# Altium footprint library LimeMicroAltiumLib.PcbLib: 876 footprints (part 32 of 57)
Each footprint in its own frame and in the unit in brackets; x right, y up, seen from the top. Pads: shape width x height; smd on the part's side, far side on the other; paste and mask are expansions set on the pad; w line width, h text height; cw(c..) or ccw(c..) is an arc to the next point about the centre after c.
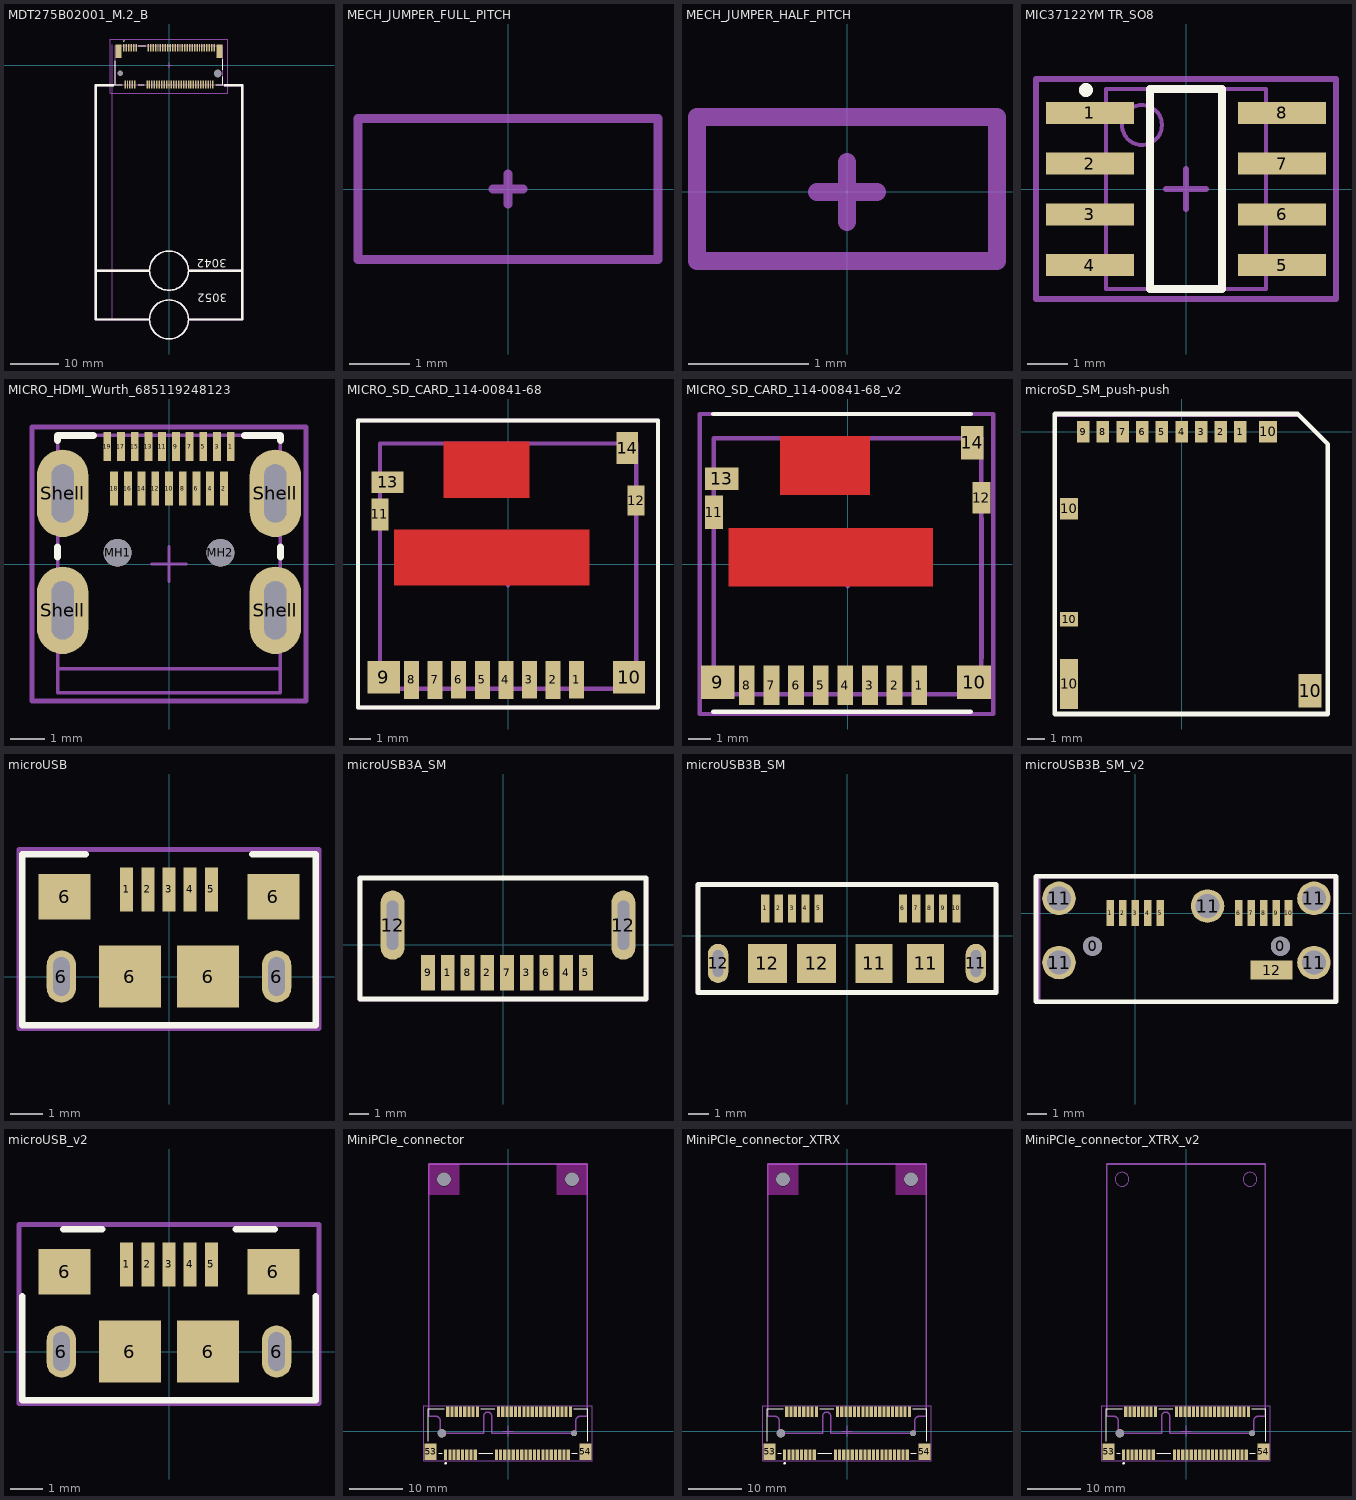
[diagram p31: the footprints below, top view; thin cyan lines are the x and y axes]

## MDT275B02001_M.2_B [mm]
pads (71):
  rect 0.3x1.55 smd mask+0.03: 1(-9.25,3.6) 2(-9,-3.95) 3(-8.75,3.6) 4(-8.5,-3.95) 5(-8.25,3.6) 6(-8,-3.95) 7(-7.75,3.6) 8(-7.5,-3.95) 9(-7.25,3.6) 10(-7,-3.95) 11(-6.75,3.6) 20(-4.5,-3.95) 21(-4.25,3.6) 22(-4,-3.95) 23(-3.75,3.6) 24(-3.5,-3.95) 25(-3.25,3.6) 26(-3,-3.95) 27(-2.75,3.6) 28(-2.5,-3.95) 29(-2.25,3.6) 30(-2,-3.95) 31(-1.75,3.6) 32(-1.5,-3.95) 33(-1.25,3.6) 34(-1,-3.95) 35(-0.75,3.6) 36(-0.5,-3.95) 37(-0.25,3.6) 38(0,-3.95) 39(0.25,3.6) 40(0.5,-3.95) 41(0.75,3.6) 42(1,-3.95) 43(1.25,3.6) 44(1.5,-3.95) 45(1.75,3.6) 46(2,-3.95) 47(2.25,3.6) 48(2.5,-3.95) 49(2.75,3.6) 50(3,-3.95) 51(3.25,3.6) 52(3.5,-3.95) 53(3.75,3.6) 54(4,-3.95) 55(4.25,3.6) 56(4.5,-3.95) 57(4.75,3.6) 58(5,-3.95) 59(5.25,3.6) 60(5.5,-3.95) 61(5.75,3.6) 62(6,-3.95) 63(6.25,3.6) 64(6.5,-3.95) 65(6.75,3.6) 66(7,-3.95) 67(7.25,3.6) 68(7.5,-3.95) 69(7.75,3.6) 70(8,-3.95) 71(8.25,3.6) 72(8.5,-3.95) 73(8.75,3.6) 74(9,-3.95) 75(9.25,3.6)
  round 0.55 hole 1.1 unplated: MH1(-10,-1.675)
  round 0.8 hole 1.6 unplated: MH2(10,-1.675)
  rect 1.2x2.75 smd mask+0.03: MP1(-10.35,2.825) MP2(10.35,2.825)
Top Overlay:
  circle w0.3: c0,-52.075 r4
  circle w0.3: c0,-42.075 r4
  lines w0.2: -11,0.9 -11,-4.025 -9.6,-4.025 ; -6.3,-4.025 -5.1,-4.025 ; -6.3,4.025 -4.8,4.025 ; 9.6,-4.025 11,-4.025 11,-2.4 ; 11,-0.9 11,1.2 ; -9.25,4.95 cw(c-9.25,5) -9.25,5.05 ; -9.25,4.95 ccw(c-9.25,5) -9.25,5.05 ; -9.25,4.95 cw(c-9.25,5) -9.25,5.05
  lines w0.5: -15,-42.075 -4.25,-42.075 ; -11.4,-4.075 -15,-4.075 -15,-52.075 -4.25,-52.075 ; 4.25,-52.075 15,-52.075 15,-4.075 11.4,-4.075 ; 4.25,-42.075 15,-42.075
  text "3052" at 11.9,-46.15 h3
  text "3042" at 11.875,-39.125 h3
Mechanical 13:
  lines w0.1: -11,-4.025 11,-4.025 11,4.025 -11,4.025 -11,-4.025
Mechanical 15:
  circle w0.3: c0,-42.075 r4
  circle w0.3: c0,-52.075 r4
  lines w0.1: -11.675,-52.075 -11.675,-0.075 ; -11.675,4.225 -11.675,-0.075 ; -11.15,-42.075 -11.675,-42.075 -11.675,-0.075 ; -12,-5.725 -12,5.375 12,5.375 12,-5.725 -12,-5.725
  lines w0.15: -0.5,0 0.5,0 ; 0,-0.5 0,0.5
  lines w0.2: -9.25,3.55 cw(c-9.25,3.6) -9.25,3.65 ; -9.25,3.55 ccw(c-9.25,3.6) -9.25,3.65 ; -9.25,3.55 cw(c-9.25,3.6) -9.25,3.65
  lines w0.5: -15,-42.075 -4.25,-42.075 ; -11.4,-4.075 -15,-4.075 -15,-52.075 -4.25,-52.075 ; 4.25,-52.075 15,-52.075 15,-4.075 11.4,-4.075 ; 4.25,-42.075 15,-42.075
  text "3042" at 11.875,-39.125 h3
  text "3052" at 11.9,-46.15 h3
  text ".Designator" at 0,0 h0.55
3D body "User Library-M_2_3042_Key_B_card.step": height 3.3, standoff 1, extent -15,-42.075 15,-0.075
3D body "MDT275B02001.stp": height 2.72, standoff -0.58, extent -11,-4.45 11,4.1

## MECH_JUMPER_FULL_PITCH [mm]
Mechanical 15:
  lines w0.15: -0.25,0 0,0 ; 0,-0.25 0,0 ; 0,0.25 0,0 ; 0.25,0 0,0 ; -2.5,-1.175 -2.5,1.175 2.5,1.175 2.5,-1.175 -2.5,-1.175
  text ".Designator" at 0,0 h0.55
3D body "CircuitWorks-JUMPER.step": height 9.25, standoff 2.75, extent -2.5,-1.175 2.5,1.175

## MECH_JUMPER_HALF_PITCH [mm]
Mechanical 15:
  lines w0.15: -0.25,0 0,0 ; 0,-0.25 0,0 ; 0,0.25 0,0 ; 0.25,0 0,0 ; -1.25,-0.575 1.25,-0.575 1.25,0.625 -1.25,0.625 -1.25,-0.575
  text ".Designator" at 0,0 h0.55
3D body "User Library-PinHeader50mil.STEP": height 7.3, standoff 1.8, extent -1.25,-0.6 1.25,0.6

## MIC37122YM TR_SO8 [mm] "SOIC, 8-Leads, Body 4,90x3,90mm, Pitch 1,27mm, IPC Medium Density"
height 1.7
pads (8):
  rect 2.2x0.55 smd: 1(-2.4,1.905) 2(-2.4,0.635) 3(-2.4,-0.635) 4(-2.4,-1.905) 5(2.4,-1.905) 6(2.4,-0.635) 7(2.4,0.635) 8(2.4,1.905)
Top Overlay:
  circle w0.25: c-2.5,2.475 r0.05
  lines w0.2: -0.9,-2.5 0.9,-2.5 0.9,2.5 -0.9,2.5 -0.9,-2.5
Mechanical 13:
  circle w0.1: c-1.1,1.6 r0.5
  lines w0.1: -2,-2.5 2,-2.5 2,2.5 -2,2.5 -2,-2.5
Mechanical 15:
  circle w0.35: c-2.8,1.9 r0.1
  lines w0.15: -0.5,0 0.5,0 ; 0,-0.5 0,0.5 ; -3.75,-2.75 3.75,-2.75 3.75,2.75 -3.75,2.75 -3.75,-2.75
  text ".Designator" at 0,0 h0.55
3D body "CircuitWorks-SO-8.step": height 1.45, standoff 0, extent -2.889,-2.45 2.889,2.452

## MICRO_HDMI_Wurth_685119248123 [mm] "Also compatible with Molex 0467651301 and Amphenol 10118242-001RLF"
height 3
pads (25):
  rect 0.23x0.85 smd mask+0.03: 1(1.8,3.425) 3(1.4,3.425) 5(1,3.425) 7(0.6,3.425) 9(0.2,3.425) 11(-0.2,3.425) 13(-0.6,3.425) 15(-1,3.425) 17(-1.4,3.425) 19(-1.8,3.425)
  rect 0.23x1 smd mask+0.03: 2(1.6,2.2) 4(1.2,2.2) 6(0.8,2.2) 8(0.4,2.2) 10(0,2.2) 12(-0.4,2.2) 14(-0.8,2.2) 16(-1.2,2.2) 18(-1.6,2.2)
  round 0.81 hole 0.81 unplated: MH1(-1.5,0.33) MH2(1.5,0.33)
  oval 1.5x2.55 hole 0.65 slot 1.7 at 90 deg: Shell(-3.1,-1.35) Shell(-3.1,2.06) Shell(3.1,-1.35) Shell(3.1,2.06)
Top Overlay:
  lines w0.2: -3.25,0.2 -3.25,0.5 ; -3.25,3.6 -3.25,3.75 -2.2,3.75 ; 2.2,3.75 3.25,3.75 3.25,3.6 ; 3.25,0.2 3.25,0.5
Mechanical 13:
  lines w0.1: -3.25,-3.75 -3.25,3.75 3.25,3.75 3.25,-3.75 -3.25,-3.75
Mechanical 15:
  lines w0.1: -3.25,-3.05 3.25,-3.05 ; -0.5,0 0.5,0 ; 0,-0.5 0,0.5
  lines w0.15: -4,-4 -4,4 4,4 4,-4 -4,-4
  text "PCB Edge" at -1.4,-2.8 h0.41
  text ".Designator" at 0,0 h0.55
3D body "685119248123.stp": height 2.99, standoff -1.11, extent -3.25,-3.75 3.25,3.755

## MICRO_SD_CARD_114-00841-68 [mm]
pads (14):
  rect 0.7x1.75 smd mask+0.1: 1(3.2,-5.412) 6(-2.3,-5.412)
  rect 0.701x1.753 smd mask+0.1: 2(2.1,-5.412) 8(-4.5,-5.412)
  rect 0.701x1.752 smd mask+0.1: 3(1,-5.412) 4(-0.1,-5.412) 5(-1.2,-5.412) 7(-3.4,-5.412)
  rect 1.501x1.501 smd mask+0.1: 9(-5.8,-5.288)
  rect 1.502x1.502 smd mask+0.1: 10(5.65,-5.288)
  rect 0.801x1.501 smd mask+0.1: 11(-5.975,2.312)
  rect 0.8x1.401 smd mask+0.1: 12(5.975,2.963)
  rect 1.5x1 smd mask+0.1: 13(-5.62,3.812)
  rect 1.001x1.502 smd mask+0.1: 14(5.575,5.413)
Top Layer:
  pour cut-out: 1,3.1 -3,3.1 -3,5.7 1,5.7
  pour cut-out: 3.8,-1 -5.3,-1 -5.3,1.6 3.8,1.6
Top Overlay:
  lines w0.2: -7,-6.7 7,-6.7 7,6.7 -7,6.7 -7,-6.7
Top Solder:
  region: -6.475,3.15 -6.475,4.425 -4.75,4.425 -4.75,3.2 -5.475,3.2 -5.475,3.15
Mechanical 13:
  lines w0.2: -5.975,-5.841 -5.975,5.626 ; -5.975,-5.826 5.976,-5.826 ; -5.975,-4.145 -5.975,-0.109 ; -5.975,-0.104 -5.975,1.237 ; 4.656,5.626 -5.975,5.626 ; 5.982,-5.831 5.982,5.626 ; 5.985,-4.215 5.985,-0.104 ; 5.988,-0.105 5.988,2.043 ; 5.988,5.626 -5.975,5.626
Mechanical 15:
  lines w0.2: -1,0 0,0 ; 0,-1 0,0 ; 0,1 0,0 ; 1,0 0,0 ; -7,-6.7 7,-6.7 7,6.7 -7,6.7 -7,-6.7
  text "8" at -4.6,-4.4 h0.55
  text "1" at 3.1,-4.4 h0.55
  text ".Designator" at 0,0 h0.55
3D body "User Library-Micro_SD.step": height 1.45, standoff 0.47, extent -5.5,-9.9 5.5,5.1
3D body "User Library-Micro SD Holder 114-00841-68.step": height 1.6, standoff 0, extent -6,-5.85 6,5.75

## MICRO_SD_CARD_114-00841-68_v2 [mm]
pads (14):
  rect 0.7x1.75 smd mask+0.1: 1(3.2,-5.412) 6(-2.3,-5.412)
  rect 0.701x1.753 smd mask+0.1: 2(2.1,-5.412) 8(-4.5,-5.412)
  rect 0.701x1.752 smd mask+0.1: 3(1,-5.412) 4(-0.1,-5.412) 5(-1.2,-5.412) 7(-3.4,-5.412)
  rect 1.501x1.501 smd mask+0.1: 9(-5.8,-5.288)
  rect 1.502x1.502 smd mask+0.1: 10(5.65,-5.288)
  rect 0.801x1.501 smd mask+0.1: 11(-5.975,2.312)
  rect 0.8x1.401 smd mask+0.1: 12(5.975,2.963)
  rect 1.5x1 smd mask+0.1: 13(-5.62,3.812)
  rect 1.001x1.502 smd mask+0.1: 14(5.575,5.413)
Top Layer:
  pour cut-out: 1,3.1 -3,3.1 -3,5.7 1,5.7
  pour cut-out: 3.8,-1 -5.3,-1 -5.3,1.6 3.8,1.6
Top Overlay:
  lines w0.2: -6,-6.6 5.5,-6.6 ; -6,6.7 5.5,6.7
Top Solder:
  region: -6.475,3.15 -6.475,4.425 -4.75,4.425 -4.75,3.2 -5.475,3.2 -5.475,3.15
Mechanical 13:
  lines w0.2: -5.975,-5.841 -5.975,5.626 ; -5.975,-5.826 5.976,-5.826 ; -5.975,-4.145 -5.975,-0.109 ; -5.975,-0.104 -5.975,1.237 ; 4.656,5.626 -5.975,5.626 ; 5.982,-5.831 5.982,5.626 ; 5.985,-4.215 5.985,-0.104 ; 5.988,-0.105 5.988,2.043 ; 5.988,5.626 -5.975,5.626
Mechanical 15:
  lines w0.2: -1,0 0,0 ; 0,-1 0,0 ; 0,1 0,0 ; 1,0 0,0 ; -6.6,-6.7 -6.6,6.7 6.5,6.7 6.5,-6.7 -6.6,-6.7
  text "8" at -4.6,-4.4 h0.55
  text "1" at 3.1,-4.4 h0.55
  text ".Designator" at 0,0 h0.55
3D body "User Library-Micro_SD.step": height 1.45, standoff 0.47, extent -5.5,-9.9 5.5,5.1
3D body "User Library-Micro SD Holder 114-00841-68.step": height 1.6, standoff 0, extent -6,-5.85 6,5.75

## microSD_SM_push-push [mm]
pads (14):
  rect 0.7x1.2 smd: 1(3.3,0) 2(2.2,0) 3(1.1,0) 4(0,0) 5(-1.1,0) 6(-2.2,0) 7(-3.3,0) 8(-4.4,0) 9(-5.5,0)
  rect 1x2.8 smd: 10(-6.3,-14.11)
  rect 1x0.8 smd: 10(-6.3,-10.5)
  rect 1x1.2 smd: 10(-6.3,-4.3) 10(4.85,0)
  rect 1.3x1.9 smd: 10(7.2,-14.5)
Top Overlay:
  lines w0.254: -7.1,-15.8 -7.1,1 6.5,1 8.2,-0.7 8.2,-15.8 -7.1,-15.8
Mechanical 15:
  lines w0.15: -7.1,-15.8 -7.1,1 -7,0.9 6.625,0.9 8.2,-0.675 8.2,-15.8 -7.1,-15.8
  text ".Designator" at 0.4,-8.1 h0.55
3D body "DM3AT-SF-PEJM5.stp": height 1.68, standoff 0, extent -6.425,-16.1 7.425,0.05
3D body "User Library-Micro_SD.step": height 1.45, standoff 0.47, extent -5.5,-17.3 5.5,-2.3

## microUSB [mm]
pads (11):
  rect 0.4x1.35 smd mask+0.05: 1(-1.3,2.675) 2(-0.65,2.675) 3(0,2.675) 4(0.65,2.675) 5(1.3,2.675)
  oval 0.9x1.6 hole 0.5 slot 1.2 at 90 deg: 6(-3.3,0) 6(3.3,0)
  rect 1.6x1.4 smd: 6(-3.2,2.45) 6(3.2,2.45)
  rect 1.9x1.9 smd: 6(-1.2,0) 6(1.2,0)
Top Overlay:
  lines w0.2: -2.55,3.75 -4.5,3.75 -4.5,-1.5 4.5,-1.5 4.5,3.75 2.55,3.75
Mechanical 15:
  lines w0.15: -4.6,-1.6 -4.6,3.9 4.6,3.9 4.6,-1.6 -4.6,-1.6
  text ".Designator" at 0,1.3 h0.55
3D body "USB3090-30-A_revE.step": height 2.59, standoff -1, extent -3.891,-2.565 3.892,2.925

## microUSB3A_SM [mm]
pads (11):
  rect 0.7x1.8 smd: 1(-2.8,-1.4) 2(-0.8,-1.4) 3(1.2,-1.4) 4(3.2,-1.4) 5(4.2,-1.4) 6(2.2,-1.4) 7(0.2,-1.4) 8(-1.8,-1.4) 9(-3.8,-1.4)
  oval 1.2x3.5 hole 0.6 slot 2.5 at 90 deg: 12(-5.6,1) 12(6.1,1)
Top Overlay:
  lines w0.254: -7.25,-2.75 -7.25,3.4 7.25,3.4 7.25,-2.75 -7.25,-2.75
Mechanical 15:
  lines w0.15: -7.3,-2.8 -7.3,3.4 7.3,3.4 7.3,-2.8 -7.3,-2.8
  text ".Designator" at 0,0.1 h0.55
3D body "692112030100.stp": height 1.8, standoff -2.7, extent -5.8,-1.954 6.2,18.8

## microUSB3B_SM [mm]
pads (16):
  rect 0.4x1.35 smd mask+0.05: 1(-3.975,1.338) 2(-3.325,1.338) 3(-2.675,1.338) 4(-2.025,1.338) 5(-1.375,1.338) 6(2.725,1.338) 7(3.375,1.338) 8(4.025,1.338) 9(4.675,1.338) 10(5.325,1.338)
  rect 1.8x1.9 smd: 11(1.325,-1.338) 11(3.825,-1.338)
  oval 1x1.9 hole 0.5 slot 1.3 at 90 deg: 11(6.275,-1.338) 12(-6.275,-1.338)
  rect 1.9x1.9 smd: 12(-3.875,-1.338) 12(-1.475,-1.338)
Top Overlay:
  lines w0.254: -7.25,-2.75 -7.25,2.5 7.25,2.5 7.25,-2.75 -7.25,-2.75
Mechanical 15:
  lines w0.15: -7.3,-2.8 -7.3,2.5 7.3,2.5 7.3,-2.8 -7.3,-2.8
  text ".Designator" at 0,0.1 h0.55
3D body "USB3110-30-A_revF.step": height 2.73, standoff -1, extent -6.707,-4.118 6.707,1.8

## microUSB3B_SM_v2 [mm] "GSB443T33HRCT-ND"
pads (18):
  round 1 hole 1: 0(-2.225,-1.73) 0(7.575,-1.73)
  rect 0.4x1.35 smd mask+0.05: 1(-1.3,0) 2(-0.65,0) 3(0,0) 4(0.65,0) 5(1.3,0) 6(5.4,0) 7(6.05,0) 8(6.7,0) 9(7.35,0) 10(8,0)
  round 1.75 hole 1.25: 11(-3.975,-2.58) 11(-3.975,0.77) 11(3.775,0.37) 11(9.325,-2.58) 11(9.325,0.77)
  rect 2.18x0.98 smd: 12(7.115,-2.97)
Top Overlay:
  lines w0.254: -5.175,-4.625 -5.175,1.925 10.475,1.925 10.475,-4.625 -5.175,-4.625
Mechanical 15:
  lines w0.15: -5.025,-4.625 -5.025,1.875 10.4,1.875 10.4,-4.625 -5.025,-4.625
  text ".Designator" at 2.675,-1.238 h0.55
3D body "USB3110-30-A_revF.step": height 5.73, standoff 2, extent -4.032,-6.525 9.382,-0.607
3D body: height 4, standoff 0, extent -4.032,-4.625 9.382,-0.607

## microUSB_v2 [mm]
pads (11):
  rect 0.4x1.35 smd mask+0.05: 1(-1.3,2.675) 2(-0.65,2.675) 3(0,2.675) 4(0.65,2.675) 5(1.3,2.675)
  oval 0.9x1.6 hole 0.5 slot 1.2 at 90 deg: 6(-3.3,0) 6(3.3,0)
  rect 1.6x1.4 smd: 6(-3.2,2.45) 6(3.2,2.45)
  rect 1.9x1.9 smd: 6(-1.2,0) 6(1.2,0)
Top Overlay:
  lines w0.2: -4.5,1.7 -4.5,-1.5 4.5,-1.5 4.5,1.7 ; -3.25,3.75 -2.05,3.75 ; 2.05,3.75 3.25,3.75
Mechanical 15:
  lines w0.15: -4.6,-1.6 4.6,-1.6 4.6,3.9 -4.6,3.9 -4.6,-1.6
  text ".Designator" at 0,1.3 h0.55
3D body "USB3090-30-A_revE.step": height 2.59, standoff -1, extent -3.891,-2.565 3.892,2.925

## MiniPCIe_connector [mm]
pads (58):
  rect 0.6x2 smd paste+0 mask+0: 1(-11.8,-4.5) 2(-11.4,3.7) 3(-11,-4.5) 4(-10.6,3.7) 5(-10.2,-4.5) 6(-9.8,3.7) 7(-9.4,-4.5) 8(-9,3.7) 9(-8.6,-4.5) 10(-8.2,3.7) 11(-7.8,-4.5) 12(-7.4,3.7) 13(-7,-4.5) 14(-6.6,3.7) 15(-6.2,-4.5) 16(-5.8,3.7) 17(-2.2,-4.5) 18(-1.8,3.7) 19(-1.4,-4.5) 20(-1,3.7) 21(-0.6,-4.5) 22(-0.2,3.7) 23(0.2,-4.5) 24(0.6,3.7) 25(1,-4.5) 26(1.4,3.7) 27(1.8,-4.5) 28(2.2,3.7) 29(2.6,-4.5) 30(3,3.7) 31(3.4,-4.5) 32(3.8,3.7) 33(4.2,-4.5) 34(4.6,3.7) 35(5,-4.5) 36(5.4,3.7) 37(5.8,-4.5) 38(6.2,3.7) 39(6.6,-4.5) 40(7,3.7) 41(7.4,-4.5) 42(7.8,3.7) 43(8.2,-4.5) 44(8.6,3.7) 45(9,-4.5) 46(9.4,3.7) 47(9.8,-4.5) 48(10.2,3.7) 49(10.6,-4.5) 50(11,3.7) 51(11.4,-4.5) 52(11.8,3.7)
  rect 2.3x3.2 smd paste+0 mask+0: 53(-14.65,-3.9) 54(14.65,-3.9)
  round 2.3 hole 2.6 unplated: MH1(-12.1,47.65) MH2(12.1,47.65)
  round 1.6 hole 1.6 unplated paste-1000 mask+0: ""(-12.5,-0.4)
  round 1.1 hole 1.1 unplated paste-1000 mask+0: ""(12.5,-0.4)
Top Overlay:
  circle w0.25: c-11.8,-6.1 r0.125
  lines w0.2: -15.1,-1.925 -15.1,4.2 -12.075,4.2 ; -13.125,-4.2 -12.475,-4.2 ; -5.525,-4.2 -2.875,-4.2 ; -5.125,4.2 -2.475,4.2 ; 12.075,-4.2 13.125,-4.2 ; 12.475,4.2 15.1,4.2 15.1,-1.925
Keep-Out Layer:
  region: -9.2,44.75 -15,44.75 -15,50.55 -9.2,50.55 hole: -12.1,48.961 -12.439,48.917 -12.756,48.786 -13.027,48.577 -13.236,48.306 -13.367,47.989 -13.411,47.65 -13.367,47.311 -13.236,46.994 -13.027,46.723 -12.756,46.514 -12.439,46.383 -12.1,46.339 -11.761,46.383 -11.444,46.514 -11.173,46.723 -10.964,46.994 -10.833,47.311 -10.789,47.65 -10.833,47.989 -10.964,48.306 -11.173,48.577 -11.444,48.786 -11.761,48.917
  region: 9.2,44.75 9.2,50.55 15,50.55 15,44.75 hole: 13.411,47.65 13.367,47.989 13.236,48.306 13.027,48.577 12.756,48.786 12.439,48.917 12.1,48.961 11.761,48.917 11.444,48.786 11.173,48.577 10.964,48.306 10.833,47.989 10.789,47.65 10.833,47.311 10.964,46.994 11.173,46.723 11.444,46.514 11.761,46.383 12.1,46.339 12.439,46.383 12.756,46.514 13.027,46.723 13.236,46.994 13.367,47.311
Mechanical 15:
  lines w0.15: -1,0 0,0 ; 0,-1 0,0 ; 0,1 0,0 ; 1,0 0,0
  lines w0.2: -15.9,-5.6 -15.9,4.8 15.9,4.8 15.9,-5.6 -15.9,-5.6
  lines w0.3: -15,2.8 -13.65,2.8 cw(c-13.65,2) -12.85,2 -12.85,-0.4 -4.6,-0.4 -4.6,2.85 cw(c-3.85,2.85) -3.1,2.85 -3.1,-0.4 12.85,-0.4 12.85,2 cw(c13.65,2) 13.65,2.8 15,2.8 15,50.55 -15,50.55 -15,2.8
  text ".Designator" at 0,0 h0.55
  text "1" at -11.8,-4.8 h0.55
  text "2" at -11.5,3.5 h0.55
  text "52" at 11.7,3.5 h0.55
  text "51" at 11.3,-4.8 h0.55
3D body "LoRaWAN WM1302.STEP": height 4.6, standoff 0, extent -15,-0.4 15,50.6
3D body "2041119-2.stp": height 4, standoff -0.65, extent -14.95,-4.98 14.95,4.11

## MiniPCIe_connector_XTRX [mm]
pads (58):
  rect 0.6x2 smd paste+0 mask+0: 1(-11.8,-4.5) 2(-11.4,3.7) 3(-11,-4.5) 4(-10.6,3.7) 5(-10.2,-4.5) 6(-9.8,3.7) 7(-9.4,-4.5) 8(-9,3.7) 9(-8.6,-4.5) 10(-8.2,3.7) 11(-7.8,-4.5) 12(-7.4,3.7) 13(-7,-4.5) 14(-6.6,3.7) 15(-6.2,-4.5) 16(-5.8,3.7) 17(-2.2,-4.5) 18(-1.8,3.7) 19(-1.4,-4.5) 20(-1,3.7) 21(-0.6,-4.5) 22(-0.2,3.7) 23(0.2,-4.5) 24(0.6,3.7) 25(1,-4.5) 26(1.4,3.7) 27(1.8,-4.5) 28(2.2,3.7) 29(2.6,-4.5) 30(3,3.7) 31(3.4,-4.5) 32(3.8,3.7) 33(4.2,-4.5) 34(4.6,3.7) 35(5,-4.5) 36(5.4,3.7) 37(5.8,-4.5) 38(6.2,3.7) 39(6.6,-4.5) 40(7,3.7) 41(7.4,-4.5) 42(7.8,3.7) 43(8.2,-4.5) 44(8.6,3.7) 45(9,-4.5) 46(9.4,3.7) 47(9.8,-4.5) 48(10.2,3.7) 49(10.6,-4.5) 50(11,3.7) 51(11.4,-4.5) 52(11.8,3.7)
  rect 2.3x3.2 smd paste+0 mask+0: 53(-14.65,-3.9) 54(14.65,-3.9)
  round 2.3 hole 2.6 unplated: MH1(-12.1,47.65) MH2(12.1,47.65)
  round 1.6 hole 1.6 unplated paste-1000 mask+0: ""(-12.5,-0.4)
  round 1.1 hole 1.1 unplated paste-1000 mask+0: ""(12.5,-0.4)
Top Overlay:
  circle w0.25: c-11.8,-6.1 r0.125
  lines w0.2: -15.1,-1.925 -15.1,4.2 -12.075,4.2 ; -13.125,-4.2 -12.475,-4.2 ; -5.525,-4.2 -2.875,-4.2 ; -5.125,4.2 -2.475,4.2 ; 12.075,-4.2 13.125,-4.2 ; 12.475,4.2 15.1,4.2 15.1,-1.925
Keep-Out Layer:
  region: -9.2,44.75 -15,44.75 -15,50.55 -9.2,50.55 hole: -12.1,48.961 -12.439,48.917 -12.756,48.786 -13.027,48.577 -13.236,48.306 -13.367,47.989 -13.411,47.65 -13.367,47.311 -13.236,46.994 -13.027,46.723 -12.756,46.514 -12.439,46.383 -12.1,46.339 -11.761,46.383 -11.444,46.514 -11.173,46.723 -10.964,46.994 -10.833,47.311 -10.789,47.65 -10.833,47.989 -10.964,48.306 -11.173,48.577 -11.444,48.786 -11.761,48.917
  region: 9.2,44.75 9.2,50.55 15,50.55 15,44.75 hole: 13.411,47.65 13.367,47.989 13.236,48.306 13.027,48.577 12.756,48.786 12.439,48.917 12.1,48.961 11.761,48.917 11.444,48.786 11.173,48.577 10.964,48.306 10.833,47.989 10.789,47.65 10.833,47.311 10.964,46.994 11.173,46.723 11.444,46.514 11.761,46.383 12.1,46.339 12.439,46.383 12.756,46.514 13.027,46.723 13.236,46.994 13.367,47.311
Mechanical 15:
  lines w0.15: -1,0 0,0 ; 0,-1 0,0 ; 0,1 0,0 ; 1,0 0,0
  lines w0.2: -15.9,-5.6 -15.9,4.8 15.9,4.8 15.9,-5.6 -15.9,-5.6
  lines w0.3: -15,2.8 -13.65,2.8 cw(c-13.65,2) -12.85,2 -12.85,-0.4 -4.6,-0.4 -4.6,2.85 cw(c-3.85,2.85) -3.1,2.85 -3.1,-0.4 12.85,-0.4 12.85,2 cw(c13.65,2) 13.65,2.8 15,2.8 15,50.55 -15,50.55 -15,2.8
  text ".Designator" at 0,0 h0.55
  text "1" at -11.8,-4.8 h0.55
  text "2" at -11.5,3.5 h0.55
  text "52" at 11.7,3.5 h0.55
  text "51" at 11.3,-4.8 h0.55
3D body "XTRXr5.step": height 6.2, standoff -0.3, extent -14.845,-0.4 15.295,50.4
3D body "2041119-2.stp": height 4, standoff -0.65, extent -14.95,-4.98 14.95,4.11

## MiniPCIe_connector_XTRX_v2 [mm]
pads (56):
  rect 0.6x2 smd paste+0 mask+0: 1(-11.8,-4.5) 2(-11.4,3.7) 3(-11,-4.5) 4(-10.6,3.7) 5(-10.2,-4.5) 6(-9.8,3.7) 7(-9.4,-4.5) 8(-9,3.7) 9(-8.6,-4.5) 10(-8.2,3.7) 11(-7.8,-4.5) 12(-7.4,3.7) 13(-7,-4.5) 14(-6.6,3.7) 15(-6.2,-4.5) 16(-5.8,3.7) 17(-2.2,-4.5) 18(-1.8,3.7) 19(-1.4,-4.5) 20(-1,3.7) 21(-0.6,-4.5) 22(-0.2,3.7) 23(0.2,-4.5) 24(0.6,3.7) 25(1,-4.5) 26(1.4,3.7) 27(1.8,-4.5) 28(2.2,3.7) 29(2.6,-4.5) 30(3,3.7) 31(3.4,-4.5) 32(3.8,3.7) 33(4.2,-4.5) 34(4.6,3.7) 35(5,-4.5) 36(5.4,3.7) 37(5.8,-4.5) 38(6.2,3.7) 39(6.6,-4.5) 40(7,3.7) 41(7.4,-4.5) 42(7.8,3.7) 43(8.2,-4.5) 44(8.6,3.7) 45(9,-4.5) 46(9.4,3.7) 47(9.8,-4.5) 48(10.2,3.7) 49(10.6,-4.5) 50(11,3.7) 51(11.4,-4.5) 52(11.8,3.7)
  rect 2.3x3.2 smd paste+0 mask+0: 53(-14.65,-3.9) 54(14.65,-3.9)
  round 1.6 hole 1.6 unplated paste-1000 mask+0: ""(-12.5,-0.4)
  round 1.1 hole 1.1 unplated paste-1000 mask+0: ""(12.5,-0.4)
Top Overlay:
  circle w0.25: c-11.8,-6.1 r0.125
  lines w0.2: -15.1,-1.925 -15.1,4.2 -12.075,4.2 ; -13.125,-4.2 -12.475,-4.2 ; -5.525,-4.2 -2.875,-4.2 ; -5.125,4.2 -2.475,4.2 ; 12.075,-4.2 13.125,-4.2 ; 12.475,4.2 15.1,4.2 15.1,-1.925
Mechanical 15:
  circle w0.2: c-12.1,47.65 r1.3
  circle w0.2: c12.1,47.65 r1.3
  lines w0.15: -1,0 0,0 ; 0,-1 0,0 ; 0,1 0,0 ; 1,0 0,0
  lines w0.2: -15.9,-5.6 15.9,-5.6 15.9,4.8 -15.9,4.8 -15.9,-5.6
  lines w0.3: -15,2.8 -15,50.55 15,50.55 15,2.8 13.65,2.8 ccw(c13.65,2) 12.85,2 12.85,-0.4 -3.1,-0.4 -3.1,2.85 ccw(c-3.85,2.85) -4.6,2.85 -4.6,-0.4 -12.85,-0.4 -12.85,2 ccw(c-13.65,2) -13.65,2.8 -15,2.8
  text "51" at 11.3,-4.8 h0.55
  text "52" at 11.7,3.5 h0.55
  text "2" at -11.5,3.5 h0.55
  text "1" at -11.8,-4.8 h0.55
  text ".Designator" at 0,0 h0.55
3D body "2041119-2.stp": height 4, standoff -0.65, extent -14.95,-4.98 14.95,4.11
3D body "XTRXr5.step": height 6.2, standoff -0.3, extent -14.845,-0.4 15.295,50.4